# Altium footprint library CoilcraftPCB.PcbLib: 320 footprints (part 5 of 20)
Each footprint in its own frame and in the unit in brackets; x right, y up, seen from the top. Pads: shape width x height; smd on the part's side, far side on the other; paste and mask are expansions set on the pad; w line width, h text height; cw(c..) or ccw(c..) is an arc to the next point about the centre after c.
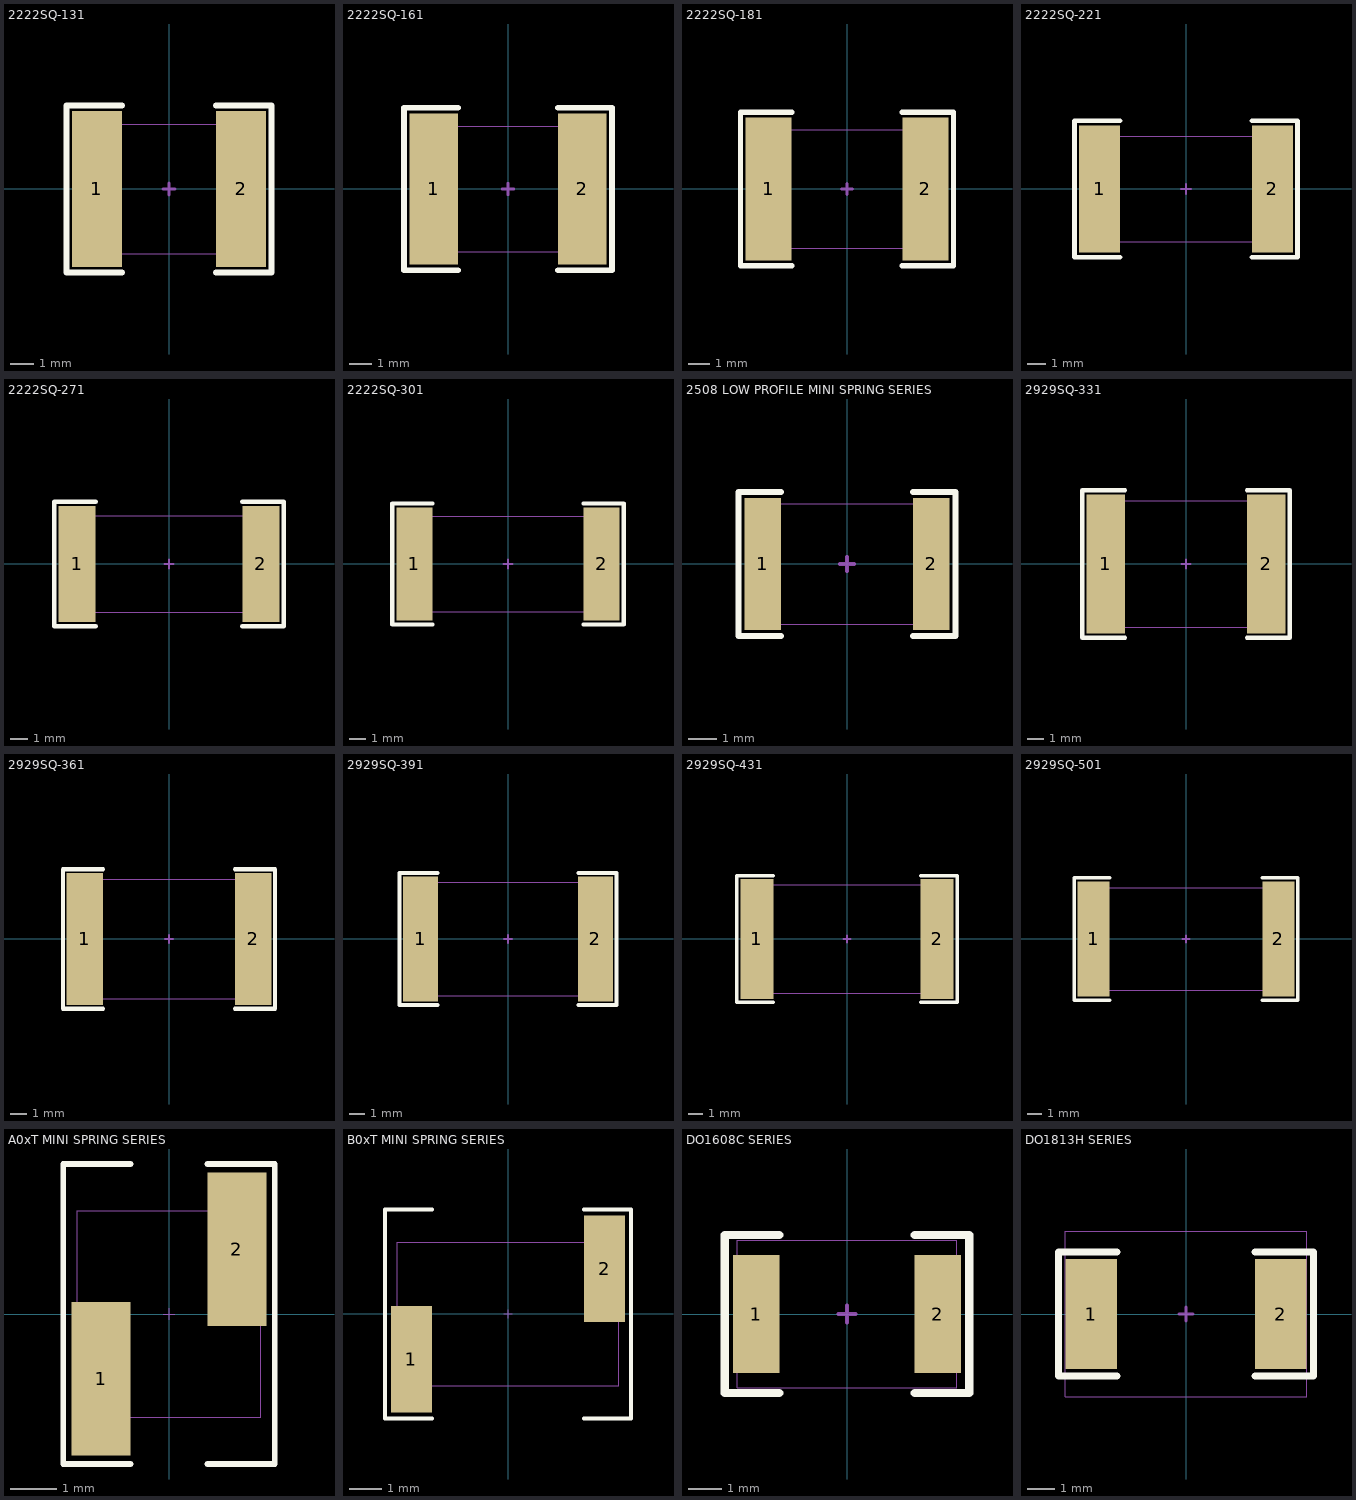
[diagram p4: the footprints below, top view; thin cyan lines are the x and y axes]

## 2222SQ-131 [mil] "Coilcraft Square Air Coil Inductor"
height 224
pads (2):
  rect 85x265 smd: 1(-122.5,0) 2(122.5,0)
Top Overlay:
  lines w10: -80,-142 -174.5,-142 -174.5,142 -80,142 ; 80,-142 174.5,-142 174.5,142 80.01,142
Mechanical 13:
  lines w5: -10,0 10,0 ; 0,-10 0,10
Mechanical 14:
  lines w1: -132.5,-110 -132.5,110 132.5,110 132.5,-110 -132.5,-110
3D body: height 224, standoff 0, extent -132.5,-110 132.5,110

## 2222SQ-161 [mil] "Coilcraft Square Air Coil Inductor"
height 224
pads (2):
  rect 85x265 smd: 1(-130,0) 2(130,0)
Top Overlay:
  lines w10: -87.5,-142 -182,-142 -182,142 -87.5,142 ; 87.5,-142 182,-142 182,142 87.51,142
Mechanical 13:
  lines w5: -10,0 10,0 ; 0,-10 0,10
Mechanical 14:
  lines w1: -145,-110 145,-110 145,110 -145,110 -145,-110
3D body: height 224, standoff 0, extent -145,-110 145,110

## 2222SQ-181 [mil] "Coilcraft Square Air Coil Inductor"
height 224
pads (2):
  rect 85x265 smd: 1(-145,0) 2(145,0)
Top Overlay:
  lines w10: -102.5,-142 -197,-142 -197,142 -102.5,142 ; 102.5,-142 197,-142 197,142 102.5,142
Mechanical 13:
  lines w5: -10,0 10,0 ; 0,-10 0,10
Mechanical 14:
  lines w1: -160,-110 160,-110 160,110 -160,110 -160,-110
3D body: height 224, standoff 0, extent -160,-110 160,110

## 2222SQ-221 [mil] "Coilcraft Square Air Coil Inductor"
height 224
pads (2):
  rect 85x265 smd: 1(-180,0) 2(180,0)
Top Overlay:
  lines w10: -137.5,-142 -232,-142 -232,142 -137.5,142 ; 137.5,-142 232,-142 232,142 137.5,142
Mechanical 13:
  lines w5: -10,0 10,0 ; 0,-10 0,10
Mechanical 14:
  lines w1: -195,-110 195,-110 195,110 -195,110 -195,-110
3D body: height 224, standoff 0, extent -195,-110 195,110

## 2222SQ-271 [mil] "Coilcraft Square Air Coil Inductor"
height 224
pads (2):
  rect 85x265 smd: 1(-210,0) 2(210,0)
Top Overlay:
  lines w10: -167.5,-142 -262,-142 -262,142 -167.5,142 ; 167.5,-142 262,-142 262,142 167.5,142
Mechanical 13:
  lines w5: -10,0 10,0 ; 0,-10 0,10
Mechanical 14:
  lines w1: -230,-110 230,-110 230,110 -230,110 -230,-110
3D body: height 224, standoff 0, extent -230,-110 230,110

## 2222SQ-301 [mil] "Coilcraft Square Air Coil Inductor"
height 224
pads (2):
  rect 85x265 smd: 1(-220,0) 2(220,0)
Top Overlay:
  lines w10: -177.5,-142 -272,-142 -272,142 -177.5,142 ; 177.5,-142 272,-142 272,142 177.5,142
Mechanical 13:
  lines w5: -10,0 10,0 ; 0,-10 0,10
Mechanical 14:
  lines w1: -235,-112.5 235,-112.5 235,112.5 -235,112.5 -235,-112.5
3D body: height 224, standoff 0, extent -235,-112.5 235,112.5

## 2508 LOW PROFILE MINI SPRING SERIES [mil] "Coilcraft Low Profile Square Air Coil Inductor"
height 79
pads (2):
  rect 50x180 smd: 1(-115,0) 2(115,0)
Top Overlay:
  lines w8: -90,-98.5 -148.5,-98.5 -148.5,98.5 -90,98.5 ; 90,-98.5 148.5,-98.5 148.5,98.5 90,98.5
Mechanical 13:
  lines w5: -10,0 10,0 ; 0,-10 0,10
Mechanical 14:
  lines w1: -115,-82.5 -115,82.5 115,82.5 115,-82.5 -115,-82.5
3D body: height 75.85, standoff -0.15, extent -126.15,-73.5 126.15,71.5

## 2929SQ-331 [mil] "Coilcraft Square Air Coil Inductor"
height 285
pads (2):
  rect 90x325 smd: 1(-187.5,0) 2(187.5,0)
Top Overlay:
  lines w10: -142.5,-172 -242,-172 -242,172 -142.5,172 ; 142.5,-172 242,-172 242,172 142.5,172
Mechanical 13:
  lines w5: -10,0 10,0 ; 0,-10 0,10
Mechanical 14:
  lines w1: -202.5,-147.5 202.5,-147.5 202.5,147.5 -202.5,147.5 -202.5,-147.5
3D body: height 285, standoff 0, extent -202.5,-147.5 202.5,147.5

## 2929SQ-361 [mil] "Coilcraft Square Air Coil Inductor"
height 285
pads (2):
  rect 90x325 smd: 1(-207.5,0) 2(207.5,0)
Top Overlay:
  lines w10: -162.5,-172 -262,-172 -262,172 -162.5,172 ; 162.5,-172 262,-172 262,172 162.5,172
Mechanical 13:
  lines w5: -10,0 10,0 ; 0,-10 0,10
Mechanical 14:
  lines w1: -222.5,-147.5 -222.5,147.5 222.5,147.5 222.5,-147.5 -222.5,-147.5
3D body: height 285, standoff 0, extent -222.5,-147.5 222.5,147.5

## 2929SQ-391 [mil] "Coilcraft Square Air Coil Inductor"
height 285
pads (2):
  rect 90x325 smd: 1(-227.5,0) 2(227.5,0)
Top Overlay:
  lines w10: -182.5,-172 -282,-172 -282,172 -182.5,172 ; 182.5,-172 282,-172 282,172 182.5,172
Mechanical 13:
  lines w5: -10,0 10,0 ; 0,-10 0,10
Mechanical 14:
  lines w1: -242.5,-147.5 -242.5,147.5 242.5,147.5 242.5,-147.5 -242.5,-147.5
3D body: height 285, standoff 0, extent -242.5,-147.5 242.5,147.5

## 2929SQ-431 [mil] "Coilcraft Square Air Coil Inductor"
height 285
pads (2):
  rect 90x325 smd: 1(-245,0) 2(245,0)
Top Overlay:
  lines w10: -200,-172 -299.5,-172 -299.5,172 -200,172 ; 200,-172 299.5,-172 299.5,172 200,172
Mechanical 13:
  lines w5: -10,0 10,0 ; 0,-10 0,10
Mechanical 14:
  lines w1: -260,-147.5 260,-147.5 260,147.5 -260,147.5 -260,-147.5
3D body: height 285, standoff 0, extent -260,-147.5 260,147.5

## 2929SQ-501 [mil] "Coilcraft Square Air Coil Inductor"
height 285
pads (2):
  rect 90x325 smd: 1(-260,0) 2(260,0)
Top Overlay:
  lines w10: -215,-172 -314.5,-172 -314.5,172 -215,172 ; 215,-172 314.5,-172 314.5,172 215,172
Mechanical 13:
  lines w5: -10,0 10,0 ; 0,-10 0,10
Mechanical 14:
  lines w1: -275,-145 275,-145 275,145 -275,145 -275,-145
3D body: height 285, standoff 0, extent -275,-145 275,145

## A0xT MINI SPRING SERIES [mil] "Mini Spring Air Core Inductor"
height 124
pads (2):
  rect 50x130 smd: 1(-57.5,-55) 2(57.5,55)
Top Overlay:
  lines w5: -32.5,-127 -89.5,-127 -89.5,127 -32.5,127 ; 32.5,-127 89.5,-127 89.5,127 32.5,127
Mechanical 13:
  lines w1: -5,0 5,0 ; 0,-5 0,5
Mechanical 14:
  lines w1: -77.5,-87.5 -77.5,87.5 77.5,87.5 77.5,-87.5 -77.5,-87.5
3D body: height 114, standoff 0, extent -69.74,-78 69.74,77

## B0xT MINI SPRING SERIES [mil] "Mini Spring Air Core Inductor"
height 124
pads (2):
  rect 50x130 smd: 1(-117.5,-55) 2(117.5,55)
Top Overlay:
  lines w5: -92.5,-127 -149.5,-127 -149.5,127 -92.5,127 ; 92.5,-127 149.5,-127 149.5,127 92.5,127
Mechanical 13:
  lines w1: -5,0 5,0 ; 0,-5 0,5
Mechanical 14:
  lines w1: -135,-87.5 -135,87.5 135,87.5 135,-87.5 -135,-87.5
3D body: height 114, standoff 0, extent -127,-77.5 127,77.5

## DO1608C SERIES [mil] "Coilcraft SMT Power Inductor"
height 115
pads (2):
  rect 55x140 smd: 1(-107.5,0) 2(107.5,0)
Top Overlay:
  lines w10: -80,-93.5 -144.5,-93.5 -144.5,93.5 -80,93.5 ; 80,-93.5 144.5,-93.5 144.5,93.5 80,93.5
Mechanical 13:
  lines w5: -10,0 10,0 ; 0,-10 0,10
Mechanical 14:
  lines w1: -130,-87.5 -130,87.5 130,87.5 130,-87.5 -130,-87.5
3D body: height 114.96, standoff -0.39, extent -129.92,-87.59 129.92,87.6

## DO1813H SERIES [mil] "Coilcraft SMT Power Inductor"
height 197
pads (2):
  rect 75x160 smd: 1(-137.5,0) 2(137.5,0)
Top Overlay:
  lines w10: -100,-90 -185,-90 -185,90 -100,90 ; 100,-90 185,-90 185,90 100,90
Mechanical 13:
  lines w5: -10,0 10,0 ; 0,-10 0,10
Mechanical 14:
  lines w1: -175,-120 -175,120 175,120 175,-120 -175,-120
3D body: height 155.39, standoff 1.06, extent -175,-120.08 175,120.08